# Altium footprint library WE-D-SUB.PcbLib: 41 footprints (part 3 of 3)
Each footprint in its own frame and in the unit in brackets; x right, y up, seen from the top. Pads: shape width x height; smd on the part's side, far side on the other; paste and mask are expansions set on the pad; w line width, h text height; cw(c..) or ccw(c..) is an arc to the next point about the centre after c.
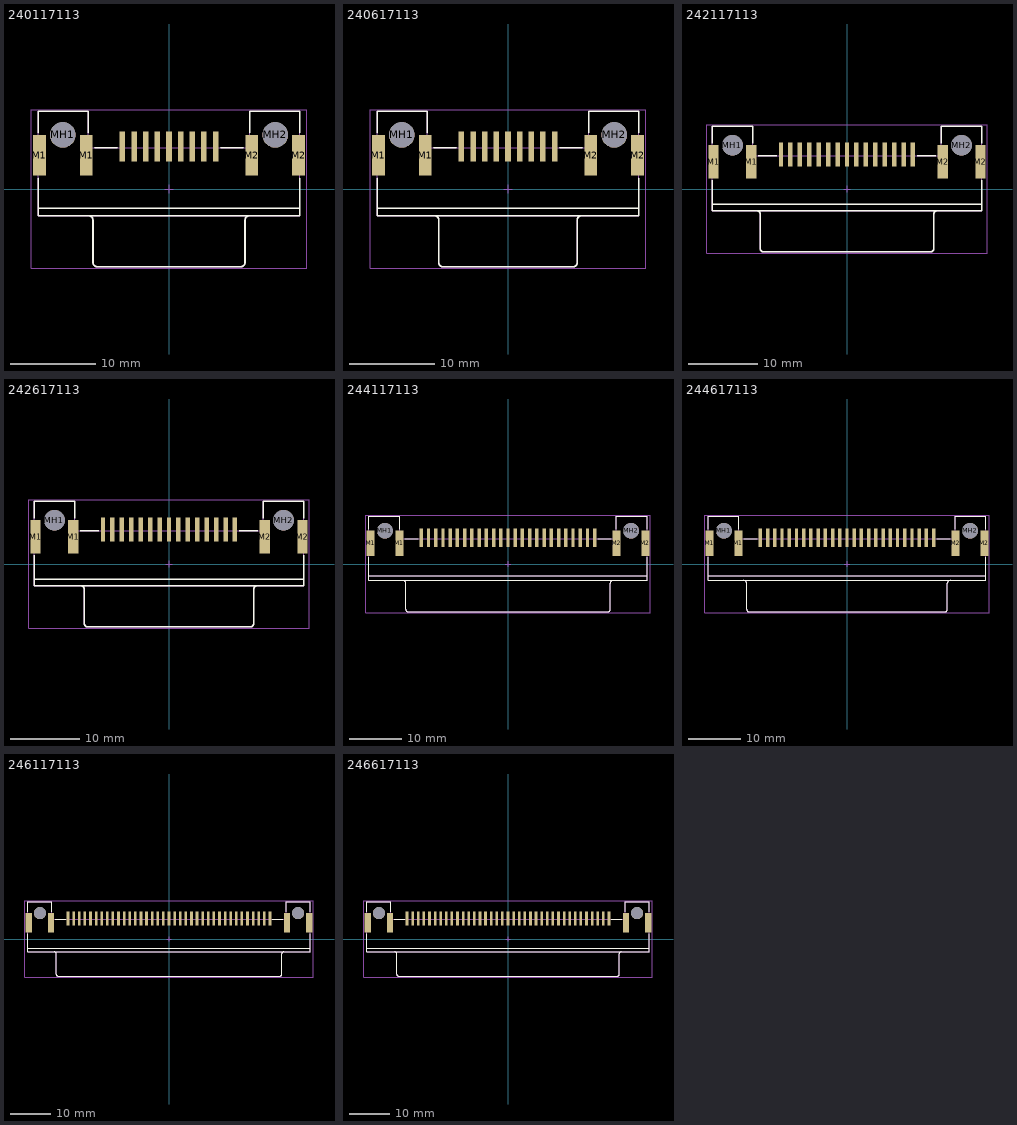
[diagram p2: the footprints below, top view; thin cyan lines are the x and y axes]

## 240117113 [mm] "WE-D-SUB Filter Connector, SMT, Angled, Male, 9p"
height 12.4
pads (15):
  rect 0.65x3.5 smd: 1(-5.48,5.01) 2(-2.74,5.01) 3(0,5.01) 4(2.74,5.01) 5(5.48,5.01) 6(-4.11,5.01) 7(-1.37,5.01) 8(1.37,5.01) 9(4.11,5.01)
  rect 1.5x4.8 smd: M1(-15.25,3.96) M1(-9.75,3.96) M2(9.75,3.96) M2(15.25,3.96)
  round 3 hole 3 unplated: MH1(-12.5,6.36) MH2(12.5,6.36)
Top Overlay:
  lines w0.2: -15.4,-2.25 15.4,-2.25 ; -15.4,1.25 -15.4,-3.15 15.4,-3.15 15.4,1.25 ; -15.4,6.65 -15.4,9.15 -9.5,9.15 -9.5,6.65 ; -9.45,-3.15 cw(c-9.45,-3.65) -8.95,-3.65 -8.95,-8.65 ccw(c-8.45,-8.65) -8.45,-9.15 8.45,-9.15 ccw(c8.45,-8.65) 8.95,-8.65 8.95,-3.65 cw(c9.45,-3.65) 9.45,-3.15 ; -8.7,4.85 -6.1,4.85 ; 6.1,4.85 8.7,4.85 ; 9.5,6.65 9.5,9.15 15.4,9.15 15.4,6.65
Top 3D Body:
  lines w0.1: -15.4,-2.25 15.4,-2.25 ; -9.45,-3.15 cw(c-9.45,-3.65) -8.95,-3.65 -8.95,-8.65 ccw(c-8.45,-8.65) -8.45,-9.15 8.45,-9.15 ccw(c8.45,-8.65) 8.95,-8.65 8.95,-3.65 cw(c9.45,-3.65) 9.45,-3.15 ; -15.4,-3.15 -15.4,9.15 -9.5,9.15 -9.5,4.85 9.5,4.85 9.5,9.15 15.4,9.15 15.4,-3.15 -15.4,-3.15
Top Courtyard:
  lines w0.05: -0.5,0 0.5,0 ; 0,-0.5 0,0.5 ; -16.2,-9.35 16.2,-9.35 16.2,9.35 -16.2,9.35 -16.2,-9.35
3D body "240117113.stp": height 12.5, standoff -3, extent -15.5,-9.14 15.5,9.16

## 240617113 [mm] "D-SUB-Filter Bent 90¡ã SMD, 9p, female"
height 12.4
pads (15):
  rect 0.65x3.5 smd: 1(5.48,5.01) 2(2.74,5.01) 3(0,5.01) 4(-2.74,5.01) 5(-5.48,5.01) 6(4.11,5.01) 7(1.37,5.01) 8(-1.37,5.01) 9(-4.11,5.01)
  rect 1.5x4.8 smd: M1(-15.25,3.96) M1(-9.75,3.96) M2(9.75,3.96) M2(15.25,3.96)
  round 3 hole 3 unplated: MH1(-12.5,6.36) MH2(12.5,6.36)
Top Overlay:
  lines w0.2: -15.4,-2.25 15.4,-2.25 ; -15.4,1.25 -15.4,-3.15 15.4,-3.15 15.4,1.25 ; -15.4,6.65 -15.4,9.15 -9.5,9.15 -9.5,6.65 ; -8.7,4.85 -6.1,4.85 ; -8.65,-3.15 cw(c-8.65,-3.65) -8.15,-3.65 -8.15,-8.65 ccw(c-7.65,-8.65) -7.65,-9.15 7.65,-9.15 ccw(c7.65,-8.65) 8.15,-8.65 8.15,-3.65 cw(c8.65,-3.65) 8.65,-3.15 ; 6.1,4.85 8.7,4.85 ; 9.5,6.65 9.5,9.15 15.4,9.15 15.4,6.65
Top 3D Body:
  lines w0.1: -15.4,-2.25 15.4,-2.25 ; -8.65,-3.15 cw(c-8.65,-3.65) -8.15,-3.65 -8.15,-8.65 ccw(c-7.65,-8.65) -7.65,-9.15 7.65,-9.15 ccw(c7.65,-8.65) 8.15,-8.65 8.15,-3.65 cw(c8.65,-3.65) 8.65,-3.15 ; -15.4,-3.15 -15.4,9.15 -9.5,9.15 -9.5,4.85 9.5,4.85 9.5,9.15 15.4,9.15 15.4,-3.15 -15.4,-3.15
Top Courtyard:
  lines w0.05: -0.5,0 0.5,0 ; 0,-0.5 0,0.5 ; -16.2,-9.35 16.2,-9.35 16.2,9.35 -16.2,9.35 -16.2,-9.35
3D body "240617113.stp": height 12.5, standoff -3, extent -15.5,-9.15 15.5,9.15

## 242117113 [mm] "WE-D-SUB Filter Connector, SMT, Angled, Male, 15p"
height 12.4
pads (21):
  rect 0.65x3.5 smd: 1(-9.59,5.01) 2(-6.85,5.01) 3(-4.11,5.01) 4(-1.37,5.01) 5(1.37,5.01) 6(4.11,5.01) 7(6.85,5.01) 8(9.59,5.01) 9(-8.22,5.04) 10(-5.48,5.04) 11(-2.74,5.04) 12(0,5.04) 13(2.74,5.04) 14(5.48,5.04) 15(8.22,5.04)
  rect 1.5x4.8 smd: M1(-19.4,3.96) M1(-13.9,3.96) M2(13.9,3.96) M2(19.4,3.96)
  round 3 hole 3 unplated: MH1(-16.65,6.36) MH2(16.65,6.36)
Top Overlay:
  lines w0.2: -19.6,-2.25 19.6,-2.25 ; -19.6,1.25 -19.6,-3.15 19.6,-3.15 19.6,1.25 ; -19.6,6.65 -19.6,9.15 -13.7,9.15 -13.7,6.65 ; -13.1,-3.15 cw(c-13.1,-3.65) -12.6,-3.65 -12.6,-8.65 ccw(c-12.1,-8.65) -12.1,-9.15 12.1,-9.15 ccw(c12.1,-8.65) 12.6,-8.65 12.6,-3.65 cw(c13.1,-3.65) 13.1,-3.15 ; -12.9,4.85 -10.2,4.85 ; 10.2,4.85 12.9,4.85 ; 13.7,6.65 13.7,9.15 19.6,9.15 19.6,6.65
Top 3D Body:
  lines w0.1: -19.6,-2.25 19.6,-2.25 ; -13.1,-3.15 cw(c-13.1,-3.65) -12.6,-3.65 -12.6,-8.65 ccw(c-12.1,-8.65) -12.1,-9.15 12.1,-9.15 ccw(c12.1,-8.65) 12.6,-8.65 12.6,-3.65 cw(c13.1,-3.65) 13.1,-3.15 ; -19.6,-3.15 19.6,-3.15 19.6,9.15 13.7,9.15 13.7,4.85 -13.7,4.85 -13.7,9.15 -19.6,9.15 -19.6,-3.15
Top Courtyard:
  lines w0.05: -0.5,0 0.5,0 ; 0,-0.5 0,0.5 ; -20.35,-9.35 20.35,-9.35 20.35,9.35 -20.35,9.35 -20.35,-9.35
3D body "242117113.stp": height 12.5, standoff -3, extent -19.65,-9.15 19.65,9.15

## 242617113 [mm] "D-SUB-Filter Bent 90¡ã SMD, 15p, female"
height 12.4
pads (21):
  rect 0.65x3.5 smd: 1(9.59,5.01) 2(6.85,5.01) 3(4.11,5.01) 4(1.37,5.01) 5(-1.37,5.01) 6(-4.11,5.01) 7(-6.85,5.01) 8(-9.59,5.01) 9(8.22,5.01) 10(5.48,5.01) 11(2.74,5.01) 12(0,5.01) 13(-2.74,5.01) 14(-5.48,5.01) 15(-8.22,5.01)
  rect 1.5x4.8 smd: M1(-19.4,3.96) M1(-13.9,3.96) M2(13.9,3.96) M2(19.4,3.96)
  round 3 hole 3 unplated: MH1(-16.65,6.36) MH2(16.65,6.36)
Top Overlay:
  lines w0.2: -19.6,-2.25 19.6,-2.25 ; -19.6,1.25 -19.6,-3.15 19.6,-3.15 19.6,1.25 ; -19.6,6.65 -19.6,9.15 -13.7,9.15 -13.7,6.65 ; -12.9,4.85 -10.2,4.85 ; -12.8,-3.15 cw(c-12.8,-3.65) -12.3,-3.65 -12.3,-8.65 ccw(c-11.8,-8.65) -11.8,-9.15 11.8,-9.15 ccw(c11.8,-8.65) 12.3,-8.65 12.3,-3.65 cw(c12.8,-3.65) 12.8,-3.15 ; 10.2,4.85 12.9,4.85 ; 13.7,6.65 13.7,9.15 19.6,9.15 19.6,6.65
Top 3D Body:
  lines w0.1: -19.6,-2.25 19.6,-2.25 ; -12.8,-3.15 cw(c-12.8,-3.65) -12.3,-3.65 -12.3,-8.65 ccw(c-11.8,-8.65) -11.8,-9.15 11.8,-9.15 ccw(c11.8,-8.65) 12.3,-8.65 12.3,-3.65 cw(c12.8,-3.65) 12.8,-3.15 ; -19.6,-3.15 -19.6,9.15 -13.7,9.15 -13.7,4.85 13.7,4.85 13.7,9.15 19.6,9.15 19.6,-3.15 -19.6,-3.15
Top Courtyard:
  lines w0.05: -0.5,0 0.5,0 ; 0,-0.5 0,0.5 ; -20.35,-9.35 -20.35,9.35 20.35,9.35 20.35,-9.35 -20.35,-9.35
3D body "242617113.stp": height 12.5, standoff -3, extent -19.65,-9.15 19.65,9.15

## 244117113 [mm] "D-SUB-Filter Bent 90¡ã SMD, 25p, male"
height 12.4
pads (31):
  rect 0.65x3.5 smd: 1(-16.56,5.01) 2(-13.8,5.01) 3(-11.04,5.01) 4(-8.28,5.01) 5(-5.52,5.01) 6(-2.76,5.01) 7(0,5.01) 8(2.76,5.01) 9(5.52,5.01) 10(8.28,5.01) 11(11.04,5.01) 12(13.8,5.01) 13(16.56,5.01) 14(-15.18,5.04) 15(-12.42,5.04) 16(-9.66,5.04) 17(-6.9,5.04) 18(-4.14,5.04) 19(-1.38,5.04) 20(1.38,5.04) 21(4.14,5.04) 22(6.9,5.04) 23(9.66,5.04) 24(12.42,5.04) 25(15.18,5.04)
  rect 1.5x4.8 smd: M1(-26.25,3.96) M1(-20.75,3.96) M2(20.75,3.96) M2(26.25,3.96)
  round 3 hole 3 unplated: MH1(-23.5,6.36) MH2(23.5,6.36)
Top Overlay:
  lines w0.2: -26.55,-2.25 26.55,-2.25 ; -26.55,1.25 -26.55,-3.15 26.55,-3.15 26.55,1.25 ; -26.55,6.65 -26.55,9.15 -20.65,9.15 -20.65,6.65 ; -20.05,-3.15 cw(c-20.05,-3.65) -19.55,-3.65 -19.55,-8.65 ccw(c-19.05,-8.65) -19.05,-9.15 19.05,-9.15 ccw(c19.05,-8.65) 19.55,-8.65 19.55,-3.65 cw(c20.05,-3.65) 20.05,-3.15 ; -19.7,4.85 -17.15,4.85 ; 17.15,4.85 19.7,4.85 ; 20.65,6.65 20.65,9.15 26.55,9.15 26.55,6.65
Top 3D Body:
  lines w0.1: -26.55,-2.25 26.55,-2.25 ; -20.05,-3.15 cw(c-20.05,-3.65) -19.55,-3.65 -19.55,-8.65 ccw(c-19.05,-8.65) -19.05,-9.15 19.05,-9.15 ccw(c19.05,-8.65) 19.55,-8.65 19.55,-3.65 cw(c20.05,-3.65) 20.05,-3.15 ; -26.55,-3.15 26.55,-3.15 26.55,9.15 20.65,9.15 20.65,4.85 -20.65,4.85 -20.65,9.15 -26.55,9.15 -26.55,-3.15
Top Courtyard:
  lines w0.05: -0.5,0 0.5,0 ; 0,-0.5 0,0.5 ; -27.2,-9.35 27.2,-9.35 27.2,9.35 -27.2,9.35 -27.2,-9.35
3D body "244117113.stp": height 12.5, standoff -3, extent -26.55,-9.15 26.55,9.15

## 244617113 [mm] "D-SUB-Filter Bent 90¡ã SMD, 25p, female"
height 12.4
pads (31):
  rect 0.65x3.5 smd: 1(16.56,5.01) 2(13.8,5.01) 3(11.04,5.01) 4(8.28,5.01) 5(5.52,5.01) 6(2.76,5.01) 7(0,5.01) 8(-2.76,5.01) 9(-5.52,5.01) 10(-8.28,5.01) 11(-11.04,5.01) 12(-13.8,5.01) 13(-16.56,5.01) 14(15.18,5.04) 15(12.42,5.04) 16(9.66,5.04) 17(6.9,5.04) 18(4.14,5.04) 19(1.38,5.04) 20(-1.38,5.04) 21(-4.14,5.04) 22(-6.9,5.04) 23(-9.66,5.04) 24(-12.42,5.04) 25(-15.18,5.04)
  rect 1.5x4.8 smd: M1(-26.27,3.96) M1(-20.77,3.96) M2(20.77,3.96) M2(26.27,3.96)
  round 3 hole 3 unplated: MH1(-23.52,6.36) MH2(23.52,6.36)
Top Overlay:
  lines w0.2: -26.55,-2.25 26.55,-2.25 ; -26.55,1.25 -26.55,-3.15 26.55,-3.15 26.55,1.25 ; -26.55,6.65 -26.55,9.15 -20.65,9.15 -20.65,6.65 ; -19.7,-3.15 cw(c-19.7,-3.65) -19.2,-3.65 -19.2,-8.65 ccw(c-18.7,-8.65) -18.7,-9.15 18.7,-9.15 ccw(c18.7,-8.65) 19.2,-8.65 19.2,-3.65 cw(c19.7,-3.65) 19.7,-3.15 ; -19.7,4.85 -17.15,4.85 ; 17.15,4.85 19.7,4.85 ; 20.65,6.65 20.65,9.15 26.55,9.15 26.55,6.65
Top 3D Body:
  lines w0.1: -26.55,-2.25 26.55,-2.25 ; -19.7,-3.15 cw(c-19.7,-3.65) -19.2,-3.65 -19.2,-8.65 ccw(c-18.7,-8.65) -18.7,-9.15 18.7,-9.15 ccw(c18.7,-8.65) 19.2,-8.65 19.2,-3.65 cw(c19.7,-3.65) 19.7,-3.15 ; -26.55,-3.15 -26.55,9.15 -20.65,9.15 -20.65,4.85 20.65,4.85 20.65,9.15 26.55,9.15 26.55,-3.15 -26.55,-3.15
Top Courtyard:
  lines w0.05: -0.5,0 0.5,0 ; 0,-0.5 0,0.5 ; -27.2,-9.35 -27.2,9.35 27.2,9.35 27.2,-9.35 -27.2,-9.35
3D body "244617113.stp": height 12.5, standoff -3, extent -26.55,-9.15 26.55,9.15

## 246117113 [mm] "D-SUB-Filter Bent 90¡ã SMD, 37p, male"
height 12.4
pads (43):
  rect 0.65x3.5 smd: 1(-24.84,5.01) 2(-22.08,5.01) 3(-19.32,5.01) 4(-16.56,5.01) 5(-13.8,5.01) 6(-11.04,5.01) 7(-8.28,5.01) 8(-5.52,5.01) 9(-2.76,5.01) 10(0,5.01) 11(2.76,5.01) 12(5.52,5.01) 13(8.28,5.01) 14(11.04,5.01) 15(13.8,5.01) 16(16.56,5.01) 17(19.32,5.01) 18(22.08,5.01) 19(24.84,5.01) 20(-23.46,5.01) 21(-20.7,5.01) 22(-17.94,5.01) 23(-15.18,5.01) 24(-12.42,5.01) 25(-9.66,5.01) 26(-6.9,5.01) 27(-4.14,5.01) 28(-1.38,5.01) 29(1.38,5.01) 30(4.14,5.01) 31(6.9,5.01) 32(9.66,5.01) 33(12.42,5.01) 34(15.18,5.01) 35(17.94,5.01) 36(20.7,5.01) 37(23.46,5.01)
  rect 1.5x4.8 smd: M1(-34.5,3.96) M1(-29,3.96) M2(29,3.96) M2(34.5,3.96)
  round 3 hole 3 unplated: MH1(-31.75,6.36) MH2(31.75,6.36)
Top Overlay:
  lines w0.2: -34.75,-2.25 34.75,-2.25 ; -34.75,1.25 -34.75,-3.15 34.75,-3.15 34.75,1.25 ; -34.75,6.65 -34.75,9.15 -28.85,9.15 -28.85,6.65 ; -28.25,-3.15 cw(c-28.25,-3.65) -27.75,-3.65 -27.75,-8.65 ccw(c-27.25,-8.65) -27.25,-9.15 27.25,-9.15 ccw(c27.25,-8.65) 27.75,-8.65 27.75,-3.65 cw(c28.25,-3.65) 28.25,-3.15 ; -27.95,4.85 -25.45,4.85 ; 25.45,4.85 27.95,4.85 ; 28.85,6.65 28.85,9.15 34.75,9.15 34.75,6.65
Top 3D Body:
  lines w0.1: -34.75,-2.25 34.75,-2.25 ; -28.25,-3.15 cw(c-28.25,-3.65) -27.75,-3.65 -27.75,-8.65 ccw(c-27.25,-8.65) -27.25,-9.15 27.25,-9.15 ccw(c27.25,-8.65) 27.75,-8.65 27.75,-3.65 cw(c28.25,-3.65) 28.25,-3.15 ; -34.75,-3.15 -34.75,9.15 -28.85,9.15 -28.85,4.85 28.85,4.85 28.85,9.15 34.75,9.15 34.75,-3.15 -34.75,-3.15
Top Courtyard:
  lines w0.05: -0.5,0 0.5,0 ; 0,-0.5 0,0.5 ; -35.45,-9.35 -35.45,9.35 35.45,9.35 35.45,-9.35 -35.45,-9.35
3D body "246117113.stp": height 12.5, standoff -3, extent -34.75,-9.15 34.75,9.15

## 246617113 [mm] "D-SUB-Filter Bent 90¡ã SMD, 37p, female"
height 12.4
pads (43):
  rect 0.65x3.5 smd: 1(24.84,5.01) 2(22.08,5.01) 3(19.32,5.01) 4(16.56,5.01) 5(13.8,5.01) 6(11.04,5.01) 7(8.28,5.01) 8(5.52,5.01) 9(2.76,5.01) 10(0,5.01) 11(-2.76,5.01) 12(-5.52,5.01) 13(-8.28,5.01) 14(-11.04,5.01) 15(-13.8,5.01) 16(-16.56,5.01) 17(-19.32,5.01) 18(-22.08,5.01) 19(-24.84,5.01) 20(23.46,5.01) 21(20.7,5.01) 22(17.94,5.01) 23(15.18,5.01) 24(12.42,5.01) 25(9.66,5.01) 26(6.9,5.01) 27(4.14,5.01) 28(1.38,5.01) 29(-1.38,5.01) 30(-4.14,5.01) 31(-6.9,5.01) 32(-9.66,5.01) 33(-12.42,5.01) 34(-15.18,5.01) 35(-17.94,5.01) 36(-20.7,5.01) 37(-23.46,5.01)
  rect 1.5x4.8 smd: M1(-34.5,3.96) M1(-29,3.96) M2(29,3.96) M2(34.5,3.96)
  round 3 hole 3 unplated: MH1(-31.75,6.36) MH2(31.75,6.36)
Top Overlay:
  lines w0.2: -34.75,-2.25 34.75,-2.25 ; -34.75,1.25 -34.75,-3.15 34.75,-3.15 34.75,1.25 ; -34.75,6.65 -34.75,9.15 -28.85,9.15 -28.85,6.65 ; -27.95,4.85 -25.45,4.85 ; -27.9,-3.15 cw(c-27.9,-3.65) -27.4,-3.65 -27.4,-8.65 ccw(c-26.9,-8.65) -26.9,-9.15 26.9,-9.15 ccw(c26.9,-8.65) 27.4,-8.65 27.4,-3.65 cw(c27.9,-3.65) 27.9,-3.15 ; 25.45,4.85 27.95,4.85 ; 28.85,6.65 28.85,9.15 34.75,9.15 34.75,6.65
Top Designator:
  text ".Designator" at -3.647,-0.357 h1
Top 3D Body:
  lines w0.1: -34.75,-2.25 34.75,-2.25 ; -27.9,-3.15 cw(c-27.9,-3.65) -27.4,-3.65 -27.4,-8.65 ccw(c-26.9,-8.65) -26.9,-9.15 26.9,-9.15 ccw(c26.9,-8.65) 27.4,-8.65 27.4,-3.65 cw(c27.9,-3.65) 27.9,-3.15 ; -34.75,-3.15 -34.75,9.15 -28.85,9.15 -28.85,4.85 28.85,4.85 28.85,9.15 34.75,9.15 34.75,-3.15 -34.75,-3.15
Top Courtyard:
  lines w0.05: -35.45,-9.35 -35.45,9.35 35.45,9.35 35.45,-9.35 -35.45,-9.35
Top Component Center:
  lines w0.1: -0.5,0 0.5,0 ; 0,-0.5 0,0.5
3D body "246617113.stp": height 12.5, standoff -3, extent -34.75,-9.15 34.75,9.15

## PCBComponent_1 [mm]